# Altium footprint library AN54LM-U20_PCB-260723.PcbLib: 1 footprints
Each footprint in its own frame and in the unit in brackets; x right, y up, seen from the top. Pads: shape width x height; smd on the part's side, far side on the other; paste and mask are expansions set on the pad; w line width, h text height; cw(c..) or ccw(c..) is an arc to the next point about the centre after c.
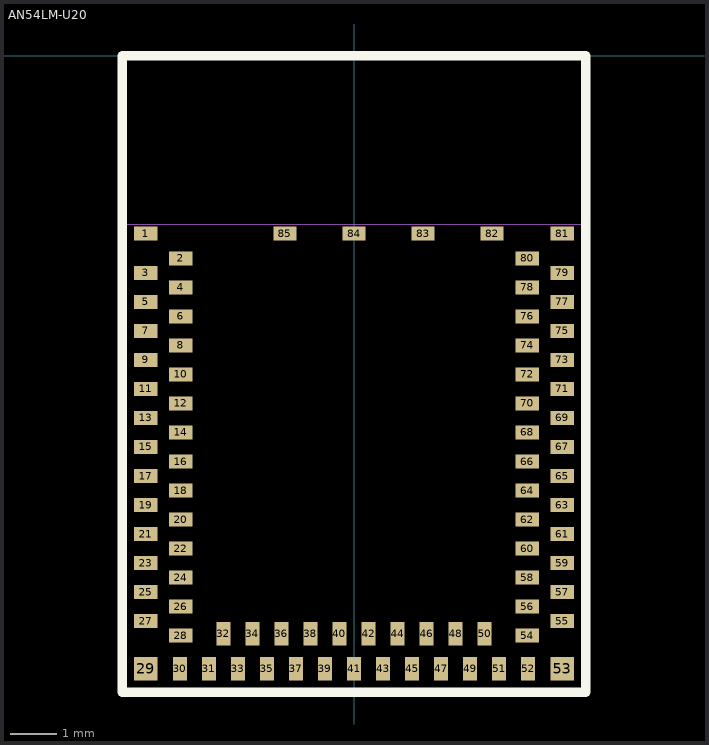
[diagram p0: the footprint, top view; thin cyan lines are the x and y axes]

## AN54LM-U20 [mm]
pads (85):
  rect 0.5x0.3 smd mask+0: 1(-4.45,-3.8) 2(-3.7,-4.33) 3(-4.45,-4.64) 4(-3.7,-4.95) 5(-4.45,-5.26) 6(-3.7,-5.57) 7(-4.45,-5.88) 8(-3.7,-6.19) 9(-4.45,-6.5) 10(-3.7,-6.81) 11(-4.45,-7.12) 12(-3.7,-7.43) 13(-4.45,-7.74) 14(-3.7,-8.05) 15(-4.45,-8.36) 16(-3.7,-8.67) 17(-4.45,-8.98) 18(-3.7,-9.29) 19(-4.45,-9.6) 20(-3.7,-9.91) 21(-4.45,-10.22) 22(-3.7,-10.53) 23(-4.45,-10.84) 24(-3.7,-11.15) 25(-4.45,-11.46) 26(-3.7,-11.77) 27(-4.45,-12.08) 28(-3.7,-12.39) 54(3.7,-12.39) 55(4.45,-12.08) 56(3.7,-11.77) 57(4.45,-11.46) 58(3.7,-11.15) 59(4.45,-10.84) 60(3.7,-10.53) 61(4.45,-10.22) 62(3.7,-9.91) 63(4.45,-9.6) 64(3.7,-9.29) 65(4.45,-8.98) 66(3.7,-8.67) 67(4.45,-8.36) 68(3.7,-8.05) 69(4.45,-7.74) 70(3.7,-7.43) 71(4.45,-7.12) 72(3.7,-6.81) 73(4.45,-6.5) 74(3.7,-6.19) 75(4.45,-5.88) 76(3.7,-5.57) 77(4.45,-5.26) 78(3.7,-4.95) 79(4.45,-4.64) 80(3.7,-4.33) 81(4.45,-3.8) 82(2.95,-3.8) 83(1.475,-3.8) 84(0,-3.8) 85(-1.475,-3.8)
  rect 0.5x0.5 smd mask+0: 29(-4.45,-13.1) 53(4.45,-13.1)
  rect 0.3x0.5 smd mask+0: 30(-3.72,-13.1) 31(-3.1,-13.1) 32(-2.79,-12.35) 33(-2.48,-13.1) 34(-2.17,-12.35) 35(-1.86,-13.1) 36(-1.55,-12.35) 37(-1.24,-13.1) 38(-0.93,-12.35) 39(-0.62,-13.1) 40(-0.31,-12.35) 41(0,-13.1) 42(0.31,-12.35) 43(0.62,-13.1) 44(0.93,-12.35) 45(1.24,-13.1) 46(1.55,-12.35) 47(1.86,-13.1) 48(2.17,-12.35) 49(2.48,-13.1) 50(2.79,-12.35) 51(3.1,-13.1) 52(3.72,-13.1)
TopOverlay:
  lines w0.2: -4.95,-13.6 4.95,-13.6 4.95,0 0,0 -4.95,0 -4.95,-13.6
Mechanical2:
  lines w0.01: -4.95,-3.6 -4.95,0 4.95,0 4.95,-3.6 -4.95,-3.6
  text "No ground pad" at -2.75,-2.425 h0.45